# Altium schematic symbol library Tony_.SchLib: 178 symbols (part 4 of 6)
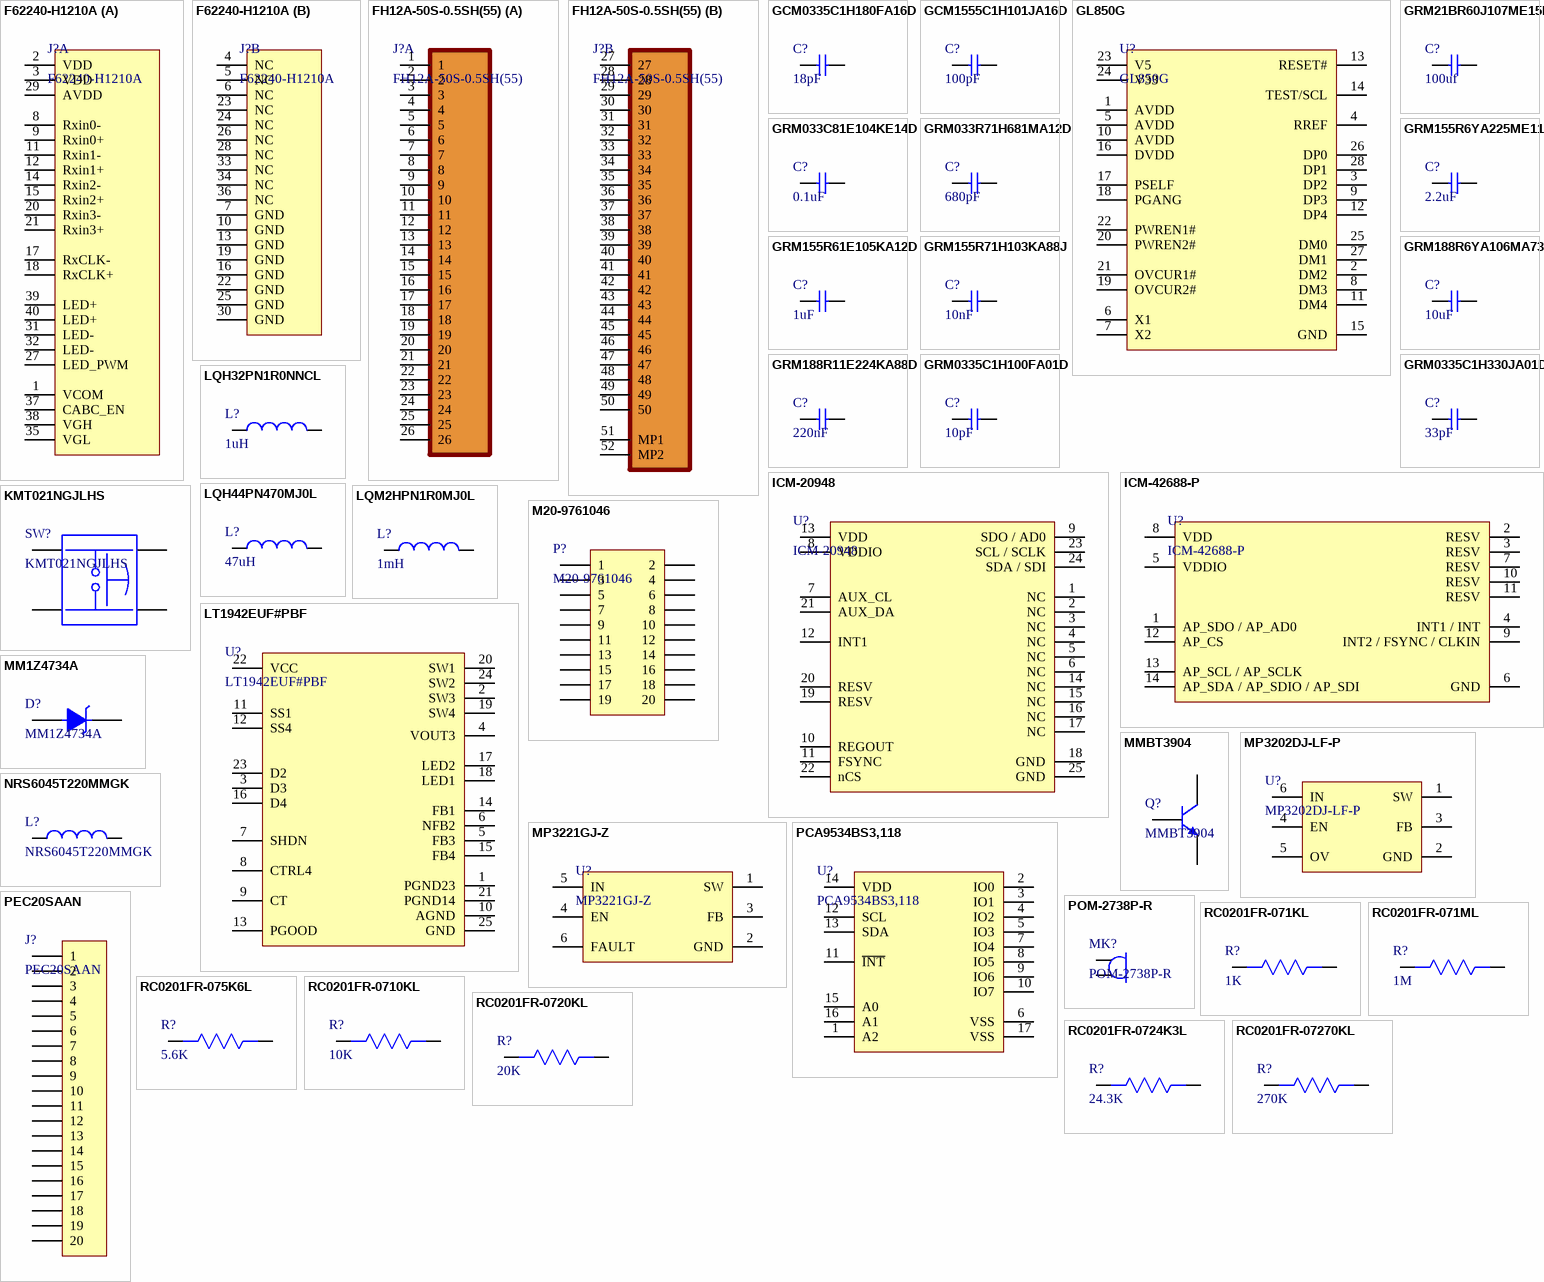
[diagram p7: symbols F62240-H1210A to RC0201FR-07270KL]

## GRM033C81E104KE14D
designator C?, comment 0.1uF
CAP CER 0.1UF 25V X6S 0201; Manufacturer: Murata; Manufacturer Part Number: GRM033C81E104KE14D; Capacitance: 100nF; Tolerance: 10%; Supplier 1: Digi-Key; RoHS: Yes; Category: Ceramic Capacitors; Stock 1: 91; Pricing 1: 1=0.10000, 10=0.05100, 50=0.02780, 100=0.02260, 500=0.01616, 1000=0.01270, 2500=0.01155, 5000=0.01063 (USD); Mount: Surface Mount; Case/Package: 0201; Case Code (Metric): 0603; Case Code (Imperial): 0201; Weight: 1.2E-05oz; Min Operating Temperature: -55°C; Max Operating Temperature: 105°C; Packaging: Tape and Reel; Voltage Rating: 25V; Dielectric: X6S; Termination: SMD/SMT; Voltage Rating (DC): 25V; Package Quantity: 15000; Length: 0.024inch; Width: 0.3mm; Height: 0.3mm; Thickness: 0.013inch; RoHS Compliant: Yes; ComponentLink1URL: http://www.mouser.com/ds/2/281/c02e-2905.pdf?src-supplier=Mouser; ComponentLink1Description: http://www.mouser.com/ds/2/281/c02e-2905.pdf?src-supplier=Mouser; ComponentLink2URL: http://www.farnell.com/datasheets/2722733.pdf?src-supplier=Farnell; ComponentLink2Description: http://www.farnell.com/datasheets/2722733.pdf?src-supplier=Farnell; ComponentLink3URL: http://search.murata.co.jp/Ceramy/image/img/A01X/G101/ENG/GRM033C81E104KE14-01.pdf?src-supplier=Digi-Key; ComponentLink3Description: http://search.murata.co.jp/Ceramy/image/img/A01X/G101/ENG/GRM033C81E104KE14-01.pdf?src-supplier=Digi-Key; Supplier Part Number 1: 490-10403-1-ND
footprint CAP 0201
pins: 1, 2

## GRM033R71H681MA12D
designator C?, comment 680pF
CAP CER 680PF 50V X7R 0201; Manufacturer: Murata; Manufacturer Part Number: GRM033R71H681MA12D; Tolerance: 20%; Supplier 1: Digi-Key; RoHS: Yes; Category: Ceramic Capacitors; Stock 1: 2794; Pricing 1: 1=0.10000, 10=0.02500, 50=0.01380, 100=0.01130, 500=0.00808, 1000=0.00635, 2500=0.00578, 5000=0.00531 (USD); Mount: Surface Mount; Case/Package: 0201; Case Code (Imperial): 0201; Case Code (Metric): 0603; Weight: 1.2E-05oz; Min Operating Temperature: -55°C; Max Operating Temperature: 125°C; Capacitance: 680pF; Packaging: Tape and Reel; Voltage Rating: 50V; Dielectric: X7R; Termination: SMD/SMT; Resistor Type: Ceramic; Voltage Rating (DC): 50V; Package Quantity: 15000; Length: 0.024inch; Width: 0.3mm; Height: 0.3mm; Thickness: 0.013inch; RoHS Compliant: Yes; ComponentLink1URL: http://www.mouser.com/ds/2/281/c02e-2905.pdf?src-supplier=Mouser; ComponentLink1Description: http://www.mouser.com/ds/2/281/c02e-2905.pdf?src-supplier=Mouser; ComponentLink2URL: http://search.murata.co.jp/Ceramy/image/img/A01X/G101/ENG/GRM033R71H681MA12-01.pdf?src-supplier=Digi-Key; ComponentLink2Description: http://search.murata.co.jp/Ceramy/image/img/A01X/G101/ENG/GRM033R71H681MA12-01.pdf?src-supplier=Digi-Key; ComponentLink3URL: https://search.murata.co.jp/Ceramy/image/img/A01X/G101/ENG/GRM033R71H681MA12-01.pdf?src-supplier=Digi-Key; ComponentLink3Description: https://search.murata.co.jp/Ceramy/image/img/A01X/G101/ENG/GRM033R71H681MA12-01.pdf?src-supplier=Digi-Key; Supplier Part Number 1: 490-16749-1-ND
footprint CAP 0201
pins: 1, 2

## GRM155R6YA225ME11D
designator C?, comment 2.2uF
CAP 2.2UF 35V X5R 20% 0402; Manufacturer: Murata; Manufacturer Part Number: GRM155R6YA225ME11D; Supplier 1: Digi-Key; Stock 1: 18773; Pricing 1: 1=0.26, 10=0.176, 100=0.0998, 500=0.07044, 1000=0.06163, 2500=0.0587, 5000=0.05429 (USD); Supplier Part Number 1: 490-18213-1-ND
footprint Cap0402
pins: 1, 2

## GRM155R61E105KA12D
designator C?, comment 1uF
CAP CER 1UF 25V X5R 0402; Manufacturer: Murata; Manufacturer Part Number: GRM155R61E105KA12D; Material: Ceramic; Tolerance: 10%; Supplier 1: Digi-Key; Stock 1: 1150750; Pricing 1: 1=0.11, 10=0.077, 100=0.0363, 500=0.02546, 1000=0.02108, 2500=0.01962, 5000=0.01795 (USD); Mount: Surface Mount; Case/Package: 0402; Weight: 0.000212oz; Case Code (Metric): 1005; Case Code (Imperial): 0402; Min Operating Temperature: -55°C; Max Operating Temperature: 85°C; Capacitance: 1uF; Voltage Rating: 25V; Packaging: Tape and Reel; Dielectric: X5R; Voltage: 25V; Termination: SMD/SMT; Voltage Rating (DC): 25V; Package Quantity: 10000; Length: 1mm; Height: 0.5mm; Width: 0.5mm; Thickness: 0.022inch; Depth: 0.5mm; REACH SVHC: No SVHC; Lead Free: Lead Free; ComponentLink1URL: http://www.farnell.com/datasheets/2048341.pdf?src-supplier=Element14; ComponentLink1Description: http://www.farnell.com/datasheets/2048341.pdf?src-supplier=Element14; Supplier Part Number 1: 490-10017-6-ND
footprint Cap0402
pins: 1, 2

## GRM155R71H103KA88J
designator C?, comment 10nF
CAP CER 10000PF 50V X7R 0402; Manufacturer: Murata; Manufacturer Part Number: GRM155R71H103KA88J; Tolerance: 10%; Supplier 1: Digi-Key; Stock 1: 2794495; Pricing 1: 1=0.1, 10=0.042, 100=0.0186, 500=0.01328, 1000=0.01044, 2500=0.00949, 5000=0.00873 (USD); Mount: Surface Mount; Case/Package: 0402; Case Code (Metric): 1005; Case Code (Imperial): 0402; Min Operating Temperature: -55°C; Max Operating Temperature: 125°C; Capacitance: 10nF; Voltage Rating: 50V; Packaging: Tape and Reel; Voltage Rating (DC): 50V; Package Quantity: 50000; Dielectric: X7R; Termination: SMD/SMT; Voltage: 50V; Length: 1mm; Height: 0.5mm; Width: 0.02inch; Thickness: 0.022inch; Depth: 0.5mm; Radiation Hardening: No; Lead Free: Lead Free; ComponentLink1URL: https://www.murata.com/~/media/webrenewal/support/library/catalog/products/capacitor/mlcc/c02e.ashx?la=en-us&src-supplier=Digi-Key; ComponentLink1Description: https://www.murata.com/~/media/webrenewal/support/library/catalog/products/capacitor/mlcc/c02e.ashx?la=en-us&src-supplier=Digi-Key; Supplier Part Number 1: 490-6351-1-ND
footprint Cap0402
pins: 1, 2

## GRM188R6YA106MA73D
designator C?, comment 10uF
CAP CER 10UF 35V X5R 0603; Manufacturer: Murata; Manufacturer Part Number: GRM188R6YA106MA73D; Tolerance: 20%; Supplier 1: Digi-Key; Stock 1: 11640; Pricing 1: 1=0.5, 10=0.346, 100=0.2076, 500=0.1557, 1000=0.13148 (USD); Mount: Surface Mount; Case/Package: 0603; Case Code (Metric): 1608; Case Code (Imperial): 0603; Min Operating Temperature: -55°C; Max Operating Temperature: 85°C; Packaging: Tape and Reel; Capacitance: 10uF; Voltage Rating: 35V; Voltage Rating (DC): 35V; Dielectric: X5R; Length: 0.063inch; Width: 0.031inch; Thickness: 0.039inch; ComponentLink1URL: http://search.murata.co.jp/Ceramy/image/img/A01X/G101/ENG/GRM188R6YA106MA73-01.pdf?src-supplier=Digi-Key; ComponentLink1Description: http://search.murata.co.jp/Ceramy/image/img/A01X/G101/ENG/GRM188R6YA106MA73-01.pdf?src-supplier=Digi-Key; ComponentLink2URL: http://search.murata.co.jp/Ceramy/image/img/A01X/G101/ENG/GRM188R6YA106MA73-01.pdf?src-supplier=Mouser; ComponentLink2Description: http://search.murata.co.jp/Ceramy/image/img/A01X/G101/ENG/GRM188R6YA106MA73-01.pdf?src-supplier=Mouser; ComponentLink3URL: https://www.murata.com/~/media/webrenewal/support/library/catalog/products/capacitor/mlcc/c02e.ashx?la=en-us&src-supplier=Digi-Key; ComponentLink3Description: https://www.murata.com/~/media/webrenewal/support/library/catalog/products/capacitor/mlcc/c02e.ashx?la=en-us&src-supplier=Digi-Key; ComponentLink4URL: http://search.murata.co.jp/Ceramy/image/img/A01X/G101/ENG/GRM188R6YA106MA73-01.pdf?src-supplier=Future+Electronics; ComponentLink4Description: http://search.murata.co.jp/Ceramy/image/img/A01X/G101/ENG/GRM188R6YA106MA73-01.pdf?src-supplier=Future+Electronics; ComponentLink5URL: http://search.murata.co.jp/Ceramy/image/img/A01X/G101/ENG/GRM188R6YA106MA73-01.pdf?src-supplier=TTI; ComponentLink5Description: http://search.murata.co.jp/Ceramy/image/img/A01X/G101/ENG/GRM188R6YA106MA73-01.pdf?src-supplier=TTI; Supplier Part Number 1: 490-13248-6-ND
footprint Cap0603
pins: 1, 2

## GRM188R11E224KA88D
designator C?, comment 220nF
CAP CER0.22uF 25V R 10%  0603; Manufacturer: Murata; Manufacturer Part Number: GRM188R11E224KA88D; Supplier 1: RSComponents; RoHS: Yes; Category: Ceramic Capacitors; Stock 1: 72; Pricing 1: 1000=0.02100, 2000=0.01900, 4000=0.01800, 8000=0.01800 (GBP); Case/Package: Ceramic; Min Operating Temperature: -55°C; Max Operating Temperature: 125°C; Capacitance: 220nF; Tolerance: 10%; Voltage Rating (DC): 25V; Length: 1.6mm; Width: 0.8mm; Height: 0.8mm; Thickness: 800um; Lead Free: Lead Free; RoHS Compliant: Yes; Supplier Part Number 1: 7980348P
footprint Cap0603
pins: 1, 2

## GRM0335C1H100FA01D
designator C?, comment 10pF
CAP CER 10PF 50V C0G/NP0 0201; Manufacturer: Murata; Manufacturer Part Number: GRM0335C1H100FA01D; Tolerance: 1%; Dielectric: C0G; Supplier 1: Digi-Key; RoHS: Yes; Category: Ceramic Capacitors; Stock 1: 317364; Pricing 1: 1=0.10000, 10=0.01900, 50=0.01060, 100=0.00860, 500=0.00616, 1000=0.00484, 2500=0.00440, 5000=0.00405 (USD); Mount: Surface Mount; Case/Package: 0201; Case Code (Metric): 0603; Case Code (Imperial): 0201; Min Operating Temperature: -55°C; Max Operating Temperature: 125°C; Termination: SMD/SMT; Package Quantity: 15000; Packaging: Tape and Reel; Capacitance: 10pF; Voltage Rating: 50V; Voltage Rating (DC): 50V; Length: 0.024inch; Width: 0.012inch; Height: 0.3mm; Thickness: 0.013inch; Lead Free: Lead Free; ComponentLink1URL: http://www.mouser.com/ds/2/281/c02e-2905.pdf?src-supplier=Mouser; ComponentLink1Description: http://www.mouser.com/ds/2/281/c02e-2905.pdf?src-supplier=Mouser; ComponentLink2URL: http://search.murata.co.jp/Ceramy/image/img/A01X/G101/ENG/GRM0335C1H100FA01-01.pdf?src-supplier=Digi-Key; ComponentLink2Description: http://search.murata.co.jp/Ceramy/image/img/A01X/G101/ENG/GRM0335C1H100FA01-01.pdf?src-supplier=Digi-Key; Supplier Part Number 1: 490-7750-1-ND
footprint CAP 0201
pins: 1, 2

## GRM0335C1H330JA01D
designator C?, comment 33pF
CAP CER 33PF 50V C0G/NP0 0201; Manufacturer: Murata; Manufacturer Part Number: GRM0335C1H330JA01D; Tolerance: 5%; Dielectric: C0G; Supplier 1: Digi-Key; RoHS: Yes; Category: Ceramic Capacitors; Stock 1: 972012; Pricing 1: 1=0.10000, 10=0.01100, 50=0.00600, 100=0.00490, 500=0.00346, 1000=0.00272, 2500=0.00248, 5000=0.00228 (USD); Mount: Surface Mount; Case/Package: 0201; Case Code (Metric): 0603; Case Code (Imperial): 0201; Min Operating Temperature: -55°C; Max Operating Temperature: 125°C; Voltage Rating: 50V; Capacitance: 33pF; Voltage Rating (DC): 50V; Packaging: Tape and Reel; Package Quantity: 15000; Termination: SMD/SMT; Voltage: 50V; Length: 0.6mm; Width: 0.3mm; Height: 0.3mm; Thickness: 0.013inch; Depth: 0.3mm; Radiation Hardening: No; Lead Free: Lead Free; ComponentLink1URL: https://datasheet.ciiva.com/11607/product-11607238.pdf?src-supplier=Avnet; ComponentLink1Description: https://datasheet.ciiva.com/11607/product-11607238.pdf?src-supplier=Avnet; ComponentLink2URL: https://datasheet.ciiva.com/6271/partnumbering-e-01-6271175.pdf?src-supplier=Digi-Key; ComponentLink2Description: https://datasheet.ciiva.com/6271/partnumbering-e-01-6271175.pdf?src-supplier=Digi-Key; ComponentLink3URL: https://datasheet.ciiva.com/6271/partnumbering-e-01-6271179.pdf?src-supplier=Digi-Key; ComponentLink3Description: https://datasheet.ciiva.com/6271/partnumbering-e-01-6271179.pdf?src-supplier=Digi-Key; Supplier Part Number 1: 490-6126-1-ND
footprint CAP 0201
pins: 1, 2

## ICM-20948
designator U?
IMU ACCEL/GYRO/COMPI2C/SPI 24QFN; Manufacturer: TDK InvenSense; Sensor Type: Accelerometer,Gyroscope,Magnetometer; Output Type: SPI,I2C; Supplier 1: Avnet; Manufacturer Part Number: ICM-20948; RoHS: Yes; Category: Inertial Measurement Units (IMUs); Pricing 1: 5000=3.86240, 10000=3.80800, 20000=3.69920, 30000=3.61760, 40000=3.48160, 50000=3.40000, 500000=3.31840 (USD); Mount: Surface Mount; Case/Package: QFN; Min Operating Temperature: -40°C; Max Operating Temperature: 85°C; Packaging: Tape and Reel; RoHS Compliant: Yes; ComponentLink1URL: http://www.farnell.com/datasheets/2632662.pdf?src-supplier=Farnell; ComponentLink1Description: http://www.farnell.com/datasheets/2632662.pdf?src-supplier=Farnell; ComponentLink2URL: https://www.invensense.com/wp-content/uploads/2016/06/App-Note-eMD-20x48-User-Guide.pdf?src-supplier=Avnet+Europe; ComponentLink2Description: https://www.invensense.com/wp-content/uploads/2016/06/App-Note-eMD-20x48-User-Guide.pdf?src-supplier=Avnet+Europe; ComponentLink3URL: https://www.invensense.com/wp-content/uploads/2016/06/App-Note-eMD-20x48-User-Guide.pdf?src-supplier=Digi-Key; ComponentLink3Description: https://www.invensense.com/wp-content/uploads/2016/06/App-Note-eMD-20x48-User-Guide.pdf?src-supplier=Digi-Key; ComponentLink4URL: http://www.farnell.com/datasheets/2632662.pdf?src-supplier=Element14; ComponentLink4Description: http://www.farnell.com/datasheets/2632662.pdf?src-supplier=Element14; ComponentLink5URL: https://www.invensense.com/wp-content/uploads/2016/06/App-Note-eMD-20x48-User-Guide.pdf?src-supplier=Avnet; ComponentLink5Description: https://www.invensense.com/wp-content/uploads/2016/06/App-Note-eMD-20x48-User-Guide.pdf?src-supplier=Avnet; ComponentLink6URL: https://www.invensense.com/wp-content/uploads/2016/06/App-Note-eMD-20x48-User-Guide.pdf?src-supplier=Component+Distributors+Inc.; ComponentLink6Description: https://www.invensense.com/wp-content/uploads/2016/06/App-Note-eMD-20x48-User-Guide.pdf?src-supplier=Component+Distributors+Inc.; Supplier Part Number 1: ICM-20948
footprint 24-QFN (3x3)
pins: 1 NC, 2 NC, 3 NC, 4 NC, 5 NC, 6 NC, 7 AUX_CL, 8 VDDIO, 9 SDO / AD0, 10 REGOUT, 11 FSYNC, 12 INT1, 13 VDD, 14 NC, 15 NC, 16 NC, 17 NC, 18 GND, 19 RESV, 20 RESV, 21 AUX_DA, 22 nCS, 23 SCL / SCLK, 24 SDA / SDI, 25 GND

## ICM-42688-P
designator U?
MOTION SENSOR; Manufacturer: TDK InvenSense; Supplier 1: Arrow Electronics; Manufacturer Part Number: ICM-42688-P; RoHS: No; Category: Inertial Measurement Units (IMUs); Stock 1: 5000; Pricing 1: 5000=3.04110 (USD); Supplier Part Number 1: ICM-42688-P
footprint ICM-42688-P
pins: 1 AP_SDO / AP_AD0, 2 RESV, 3 RESV, 4 INT1 / INT, 5 VDDIO, 6 GND, 7 RESV, 8 VDD, 9 INT2 / FSYNC / CLKIN, 10 RESV, 11 RESV, 12 AP_CS, 13 AP_SCL / AP_SCLK, 14 AP_SDA / AP_SDIO / AP_SDI

## KMT021NGJLHS
designator SW?
SWITCH TACTILE SPST-NO 0.05A 32V; Manufacturer: ITT C&K; Mechanical Life: 300000Cycles; Operating Force: 1.6N; Throw Configuration: SPST; Max Current Rating: 50mA; Power Rating: 500mW; Illumination Type: Non-Illuminated,Illuminated; Switch Travel: 0.15mm; Switch Function: Off-Mom; Actuator Type: Standard; Ratings: IP68,Waterproof,Dust Tight; Supplier 1: Digi-Key; Manufacturer Part Number: KMT021NGJLHS; RoHS: Yes; Category: Tactile Switches; Stock 1: 5223; Pricing 1: 1=0.30000, 10=0.29500, 25=0.27960, 100=0.25310, 250=0.23076, 500=0.21448, 1000=0.18297, 2500=0.17789 (USD); Mount: Surface Mount; Case/Package: SMD/SMT; Contact Material: Silver; Contact Plating: Silver; Min Operating Temperature: -40°C; Max Operating Temperature: 85°C; Max Voltage Rating (DC): 32V; Termination: J-Lead; Packaging: Tape and Reel; Package Quantity: 5000; Voltage Rating (DC): 32V; Current Rating: 50mA; Orientation: Straight; Series: KMT0; Length: 2.6mm; Depth: 3.4mm; Radiation Hardening: No; REACH SVHC: No SVHC; Lead Free: Lead Free; RoHS Compliant: Yes; ComponentLink1URL: https://datasheet.ciiva.com/5684/1443640-5684448.pdf?src-supplier=Farnell; ComponentLink1Description: https://datasheet.ciiva.com/5684/1443640-5684448.pdf?src-supplier=Farnell; ComponentLink2URL: https://datasheet.ciiva.com/2900/kmt-0xx-ngj-lhs-drawing-2900147.pdf?src-supplier=Digi-Key; ComponentLink2Description: https://datasheet.ciiva.com/2900/kmt-0xx-ngj-lhs-drawing-2900147.pdf?src-supplier=Digi-Key; ComponentLink3URL: https://datasheet.ciiva.com/2900/kmt-0xx-ngj-lhs-drawing-2900148.pdf?src-supplier=Digi-Key; ComponentLink3Description: https://datasheet.ciiva.com/2900/kmt-0xx-ngj-lhs-drawing-2900148.pdf?src-supplier=Digi-Key; ComponentLink4URL: https://datasheet.ciiva.com/2900/kmt-0xx-ngj-lhs-drawing-2900149.pdf?src-supplier=Digi-Key; ComponentLink4Description: https://datasheet.ciiva.com/2900/kmt-0xx-ngj-lhs-drawing-2900149.pdf?src-supplier=Digi-Key; ComponentLink5URL: https://datasheet.ciiva.com/22712/1443640-22712102.pdf?src-supplier=Element14; ComponentLink5Description: https://datasheet.ciiva.com/22712/1443640-22712102.pdf?src-supplier=Element14; ComponentLink6URL: https://datasheet.ciiva.com/7986/1443640-7986975.pdf?src-supplier=Element14; ComponentLink6Description: https://datasheet.ciiva.com/7986/1443640-7986975.pdf?src-supplier=Element14; Supplier Part Number 1: CKN10289CT-ND
footprint KMT021NGJLHS (Tactile Switches Ultra-LW Tact SW SMT SPNOFa 1.6N HF)
pins: 1, 2, 3, 4

## LQH32PN1R0NNCL
designator L?, comment 1uH
FIXED IND 1UH 2.5A 43.2 MOHM SMD; Manufacturer: Murata; Manufacturer Part Number: LQH32PN1R0NNCL; Core Material: Ferrite; Inductance Tolerance: 30%; Self Resonant Frequency: 100MHz; Shielding: Shielded; Saturation Current: 3A; DC Resistance (DCR): 43.2mR; Test Frequency: 1MHz; Max DC Current: 1.75A; Supplier 1: Mouser; RoHS: Yes; Category: Fixed Inductors; Stock 1: 228; Pricing 1: 1=0.48000, 10=0.33500, 50=0.33500, 100=0.28700, 1000=0.20100, 10000=0.19400 (USD); Mount: Surface Mount; Case/Package: 1210; Case Code (Metric): 3225; Case Code (Imperial): 1210; Weight: 0.000564oz; Min Operating Temperature: -40°C; Max Operating Temperature: 85°C; Package Quantity: 2000; Packaging: Tape and Reel; Tolerance: 30%; Current Rating: 2.5A; Resistor Type: Wirewound; Inductance: 1uH; Termination: SMD/SMT; Series: LQH32PN_NC; Length: 0.126inch; Width: 2.5mm; Height: 2mm; Height - Seated (Max): 0.086inch; REACH SVHC: No SVHC; Lead Free: Lead Free; RoHS Compliant: Yes; ComponentLink1URL: https://datasheet.ciiva.com/8002/1668059-8002720.pdf?src-supplier=Element14; ComponentLink1Description: https://datasheet.ciiva.com/8002/1668059-8002720.pdf?src-supplier=Element14; ComponentLink2URL: https://datasheet.ciiva.com/29691/o05e-29691893.pdf?src-supplier=Digi-Key; ComponentLink2Description: https://datasheet.ciiva.com/29691/o05e-29691893.pdf?src-supplier=Digi-Key; Supplier Part Number 1: 81-LQH32PN1R0NNCL
footprint LQH32PN1R0NNCL
footprint LQH32PN1R0NNCL.
pins: 1, 2

## LQH44PN470MJ0L
designator L?, comment 47uH
1515 Inductors (SMD) ROHS; Manufacturer: Murata Electronics; Tolerance: ±20%; Rated Current: 300mA; DC Resistance (DCR): 1.014Ω; Package: 1515; Inductance: 47uH
footprint LQH44PN470MJ0L (1515 Inductors (SMD) ROHS)
pins: 1, 2

## LQM2HPN1R0MJ0L
designator L?, comment 1mH
FIXED IND 1UH 1.5A 113 MOHM SMD; Manufacturer: Murata; Manufacturer Part Number: LQM2HPN1R0MJ0L; Core Material: Ferrite; Tolerance: 20%; Self Resonant Frequency: 70MHz; Shielding: Shielded; DC Resistance (DCR): 3.5R; Test Frequency: 1MHz; Current: 150mA; Supplier 1: Digi-Key; RoHS: Yes; Category: Fixed Inductors; Stock 1: 32294; Pricing 1: 1=0.28000, 10=0.24600, 25=0.21520, 50=0.18440, 100=0.16900, 250=0.15368, 500=0.14446, 1000=0.11065 (USD); Mount: Surface Mount; Case/Package: 1008; Case Code (Metric): 2520; Case Code (Imperial): 1008; Min Operating Temperature: -40°C; Max Operating Temperature: 125°C; Packaging: Tape and Reel; Package Quantity: 3000; Current Rating: 1.5A; Inductance: 1uH; Max DC Current: 1.5A; Termination: SMD/SMT; DC Current: 1.5A; Inductance Tolerance: 20%; Series: LQM2HP_J0; Length: 2.5mm; Width: 2mm; Height: 1.1mm; Depth: 2.2mm; Radiation Hardening: No; Military Standard: Not; REACH SVHC: No SVHC; Lead Free: Lead Free; RoHS Compliant: Yes; ComponentLink1URL: https://datasheet.ciiva.com/30489/0900766b812561f6-30489058.pdf?src-supplier=RSComponents; ComponentLink1Description: https://datasheet.ciiva.com/30489/0900766b812561f6-30489058.pdf?src-supplier=RSComponents; ComponentLink2URL: https://datasheet.ciiva.com/4960/product-4960053.pdf?src-supplier=Mouser; ComponentLink2Description: https://datasheet.ciiva.com/4960/product-4960053.pdf?src-supplier=Mouser; ComponentLink3URL: https://datasheet.ciiva.com/8510/l0075s0104lqm2hp-j0-8510485.pdf?src-supplier=Avnet; ComponentLink3Description: https://datasheet.ciiva.com/8510/l0075s0104lqm2hp-j0-8510485.pdf?src-supplier=Avnet; ComponentLink4URL: https://datasheet.ciiva.com/6709/l0075s0104lqm2hp-j0-6709723.pdf?src-supplier=Digi-Key; ComponentLink4Description: https://datasheet.ciiva.com/6709/l0075s0104lqm2hp-j0-6709723.pdf?src-supplier=Digi-Key; ComponentLink5URL: https://datasheet.ciiva.com/6709/l0075s0104lqm2hp-j0-6709724.pdf?src-supplier=Digi-Key; ComponentLink5Description: https://datasheet.ciiva.com/6709/l0075s0104lqm2hp-j0-6709724.pdf?src-supplier=Digi-Key; ComponentLink6URL: https://datasheet.ciiva.com/6709/l0075s0104lqm2hp-j0-6709725.pdf?src-supplier=Digi-Key; ComponentLink6Description: https://datasheet.ciiva.com/6709/l0075s0104lqm2hp-j0-6709725.pdf?src-supplier=Digi-Key; Supplier Part Number 1: 490-6699-1-ND
footprint IND-1008
pins: 1, 2

## LT1942EUF#PBF
designator U?
IC REG SW QUAD TFT LCD 24-QFN; Manufacturer: Analog Devices / Linear Technology; Min Input Voltage: 2.6V; Max Output Current: 4A; Max Input Voltage: 16V; Number of Outputs: 4; Output Voltage: 36V; Output Current: 750mA; Frequency: 1.2MHz; Min Output Voltage: 1.25V; Max Output Voltage: 1.2V; Output Type: Adjustable; Supplier 1: Digi-Key; Manufacturer Part Number: LT1942EUF#PBF; RoHS: Yes; Category: Voltage Regulators - Switching; Stock 1: 235; Pricing 1: 1=6.58000, 10=5.94800, 25=5.67160, 100=4.92450, 250=4.70320, 500=4.30650 (USD); Mount: Surface Mount; Case/Package: QFN; Number of Pins: 24; Min Operating Temperature: -40°C; Max Operating Temperature: 85°C; Max Supply Voltage: 16V; Min Supply Voltage: 2.6V; Package Quantity: 91; Packaging: Rail/Tube; Termination: SMD/SMT; Switching Frequency: 1.2MHz; Series: -; Length: 4mm; Width: 4mm; Height: 0.7mm; REACH SVHC: No SVHC; Lead Free: Lead Free; RoHS Compliant: Yes; ComponentLink1URL: https://datasheet.ciiva.com/4118/41364810s7494468n7433-4118973.pdf?src-supplier=Arrow+Electronics; ComponentLink1Description: https://datasheet.ciiva.com/4118/41364810s7494468n7433-4118973.pdf?src-supplier=Arrow+Electronics; ComponentLink2URL: https://datasheet.ciiva.com/25627/0900766b810ed99d-25627392.pdf?src-supplier=RSComponents; ComponentLink2Description: https://datasheet.ciiva.com/25627/0900766b810ed99d-25627392.pdf?src-supplier=RSComponents; ComponentLink3URL: https://datasheet.ciiva.com/6188/1717046-6188033.pdf?src-supplier=Farnell; ComponentLink3Description: https://datasheet.ciiva.com/6188/1717046-6188033.pdf?src-supplier=Farnell; ComponentLink4URL: https://datasheet.ciiva.com/26910/lt1942euf-pbf-26910561.pdf?src-supplier=IIIC; ComponentLink4Description: https://datasheet.ciiva.com/26910/lt1942euf-pbf-26910561.pdf?src-supplier=IIIC; ComponentLink5URL: https://datasheet.ciiva.com/22651/1717046-22651735.pdf?src-supplier=Element14; ComponentLink5Description: https://datasheet.ciiva.com/22651/1717046-22651735.pdf?src-supplier=Element14; ComponentLink6URL: https://datasheet.ciiva.com/7312/1717046-7312028.pdf?src-supplier=Newark; ComponentLink6Description: https://datasheet.ciiva.com/7312/1717046-7312028.pdf?src-supplier=Newark; Supplier Part Number 1: LT1942EUF#PBF-ND
footprint LT1942EUF#PBF (IC REG CONV TFT LCD 4OUT 24QFN)
pins: 1 PGND23, 2 SW3, 3 D3, 4 VOUT3, 5 FB3, 6 NFB2, 7 SHDN, 8 CTRL4, 9 CT, 10 AGND, 11 SS1, 12 SS4, 13 PGOOD, 14 FB1, 15 FB4, 16 D4, 17 LED2, 18 LED1, 19 SW4, 20 SW1, 21 PGND14, 22 VCC, 23 D2, 24 SW2, 25 GND

## M20-9761046
designator P?
CONN HEADER VERT 20POS 2.54MM; Manufacturer: Harwin; Max Current Rating: 3A; Contact Resistance: 30mR; Voltage Rating: 750V; Number of Positions: 20; Connector Type: Male Pin; Row Spacing: 0.1inch; Supplier 1: Digi-Key; Manufacturer Part Number: M20-9761046; Stock 1: 1185; Pricing 1: 1=0.62, 10=0.585, 100=0.4485, 500=0.39, 1000=0.32175, 5000=0.28275, 10000=0.26325 (USD); Mount: Through Hole; Contact Plating: Tin; Contact Material: Brass; Color: Black; Housing Color: Black; Housing Material: Nylon; Min Operating Temperature: -40°C; Max Operating Temperature: 105°C; Package Quantity: 300; Number of Rows: 2; Packaging: Bulk; Current Rating: 3A; Termination: Solder; Orientation: Straight; Length: 25.4mm; Pitch: 2.54mm; Contact Mating Length: 0.228inch; Depth: 5.08mm; ComponentLink1URL: http://www.mouser.com/ds/2/181/M20-976-350030.pdf?src-supplier=Mouser; ComponentLink1Description: http://www.mouser.com/ds/2/181/M20-976-350030.pdf?src-supplier=Mouser; Supplier Part Number 1: 952-1835-ND
footprint HDR2X10 (Connector; Header; 10x2 Position)
pins: 1, 2, 3, 4, 5, 6, 7, 8, 9, 10, 11, 12, 13, 14, 15, 16, 17, 18, 19, 20

## MM1Z4734A
designator D?
DIODE ZENER 5.6V 1W SOD123F; Manufacturer: ON Semiconductor / Fairchild; Manufacturer Part Number: MMSZ5V6CF; Tolerance: 5%; Impedance: 4R; Supplier 1: Arrow Electronics; RoHS: No; Category: Zener Diodes; Stock 1: 1; Pricing 1: 1=0.29450, 10=0.22220, 25=0.22020, 50=0.21840, 100=0.11270, 250=0.11160, 500=0.11050, 1000=0.08620, 3000=0.07380, 6000=0.07040, 15000=0.06690, 30000=0.06340, 75000=0.05990 (USD); Mount: Surface Mount; Case/Package: SOD; Number of Pins: 2; Weight: 0.0276g; Zener Voltage: 5.6V; Max Power Dissipation: 1W; Packaging: Tape and Reel; RoHS Compliant: No; ComponentLink1URL: http://www.farnell.com/datasheets/2572343.pdf?src-supplier=Farnell; ComponentLink1Description: http://www.farnell.com/datasheets/2572343.pdf?src-supplier=Farnell; ComponentLink2URL: http://www.onsemi.com/pub/Collateral/MMSZ36VCF-D.pdf?src-supplier=Digi-Key; ComponentLink2Description: http://www.onsemi.com/pub/Collateral/MMSZ36VCF-D.pdf?src-supplier=Digi-Key; Supplier Part Number 1: MMSZ5V6CF
footprint SOD-123F
pins: 1 CATHODE, 2 ANODE

## MMBT3904
designator Q?
TRANS NPN 40V 200MA SOT23-3; Manufacturer: ON Semiconductor / Fairchild; Max Power Dissipation: 350mW; Element Configuration: Single; Transition Frequency: 300MHz; Collector Base Voltage (VCBO): 60V; Emitter Base Voltage (VEBO): 6V; hFE Min: 100; Collector Emitter Saturation Voltage: 300mV; Number of Elements: 1; Supplier 1: Arrow Electronics; Manufacturer Part Number: MMBT3904; RoHS: Yes; Category: BJTs; Stock 1: 1; Pricing 1: 1=0.56240, 10=0.13670, 50=0.12330, 100=0.10020 (USD); Mount: Surface Mount; Case/Package: SOT-23; Number of Pins: 3; Contact Plating: Tin,Matte; Weight: 0.03g; Min Operating Temperature: -55°C; Max Operating Temperature: 150°C; Packaging: Tape and Reel; Polarity: NPN; Collector Emitter Breakdown Voltage: 40V; Package Quantity: 1; Collector Emitter Voltage (VCEO): 40V; Max Collector Current: 200mA; Gain Bandwidth Product: 300MHz; Power Dissipation: 350mW; Voltage Rating (DC): 40V; Max Breakdown Voltage: 40V; Current Rating: 200mA; Frequency: 300MHz; Max Frequency: 300MHz; Termination: SMD/SMT; Length: 0.25inch; Width: 0.25inch; Height: 0.25inch; Radiation Hardening: No; Lead Free: Lead Free; RoHS Compliant: Yes; REACH SVHC: No SVHC; ComponentLink1URL: https://datasheet.ciiva.com/971/mmbt3904-971892.pdf?src-supplier=Digi-Key; ComponentLink1Description: https://datasheet.ciiva.com/971/mmbt3904-971892.pdf?src-supplier=Digi-Key; ComponentLink2URL: https://datasheet.ciiva.com/971/mmbt3904-971893.pdf?src-supplier=Digi-Key; ComponentLink2Description: https://datasheet.ciiva.com/971/mmbt3904-971893.pdf?src-supplier=Digi-Key; ComponentLink3URL: https://datasheet.ciiva.com/22653/1922793-22653482.pdf?src-supplier=Element14; ComponentLink3Description: https://datasheet.ciiva.com/22653/1922793-22653482.pdf?src-supplier=Element14; ComponentLink4URL: https://datasheet.ciiva.com/971/mmbt3904-971891.pdf?src-supplier=Digi-Key; ComponentLink4Description: https://datasheet.ciiva.com/971/mmbt3904-971891.pdf?src-supplier=Digi-Key; ComponentLink5URL: https://datasheet.ciiva.com/26237/mmbt3904-26237242.pdf?src-supplier=Avnet+Europe; ComponentLink5Description: https://datasheet.ciiva.com/26237/mmbt3904-26237242.pdf?src-supplier=Avnet+Europe; ComponentLink6URL: https://datasheet.ciiva.com/7972/2n3904-7972669.pdf?src-supplier=Element14; ComponentLink6Description: https://datasheet.ciiva.com/7972/2n3904-7972669.pdf?src-supplier=Element14; ComponentLink7URL: https://datasheet.ciiva.com/16850/mmbt3904-16850397.pdf?src-supplier=Future+Electronics; ComponentLink7Description: https://datasheet.ciiva.com/16850/mmbt3904-16850397.pdf?src-supplier=Future+Electronics; ComponentLink8URL: https://datasheet.ciiva.com/11201/mmbt3904-11201775.pdf?src-supplier=Avnet; ComponentLink8Description: https://datasheet.ciiva.com/11201/mmbt3904-11201775.pdf?src-supplier=Avnet; Supplier Part Number 1: MMBT3904
footprint SOT-23 (TRANS NPN 40V 0.6A SOT23)
pins: 1 B, 2 E, 3 C

## MP3202DJ-LF-P
designator U?
IC LED DRIVER; Manufacturer: Monolithic Power Systems; Number of Outputs: 1; Max Supply Voltage: 6V; Output Voltage: 25V; Output Current per Channel: 1.33A; Frequency: 1.3MHz; Topology: Boost; Dimming: Analog,PWM; Supplier 1: Digi-Key; Manufacturer Part Number: MP3202DJ-LF-P; RoHS: Yes; Category: LED Drivers; Stock 1: 1282; Pricing 1: 1=2.88000, 10=2.58400, 25=2.43800, 100=1.95040, 250=1.70660 (USD); Mount: Surface Mount; Case/Package: SOT-23-6; Min Operating Temperature: -40°C; Max Operating Temperature: 85°C; Packaging: Tape and Reel; Package Quantity: 500; Series: -; RoHS Compliant: Yes; ComponentLink1URL: http://www.mouser.com/ds/2/277/MP3202_r0.91-371710.pdf?src-supplier=Mouser; ComponentLink1Description: http://www.mouser.com/ds/2/277/MP3202_r0.91-371710.pdf?src-supplier=Mouser; ComponentLink2URL: http://www.monolithicpower.com/DesktopModules/DocumentManage/API/Document/GetDocument?id=1215&src-supplier=Digi-Key; ComponentLink2Description: http://www.monolithicpower.com/DesktopModules/DocumentManage/API/Document/GetDocument?id=1215&src-supplier=Digi-Key; ComponentLink3URL: https://www.monolithicpower.com/pub/media/document/MP3202_r0.91.pdf?src-supplier=Digi-Key; ComponentLink3Description: https://www.monolithicpower.com/pub/media/document/MP3202_r0.91.pdf?src-supplier=Digi-Key; ComponentLink4URL: http://www.monolithicpower.com/pub/media/document/MP3202_r0.91.pdf?src-supplier=Digi-Key; ComponentLink4Description: http://www.monolithicpower.com/pub/media/document/MP3202_r0.91.pdf?src-supplier=Digi-Key; Supplier Part Number 1: 1589-1151-1-ND
footprint SOT-23-6 (IC BAT CHG LI-ION 1 CELL SOT23-6)
pins: 1 SW, 2 GND, 3 FB, 4 EN, 5 OV, 6 IN

## MP3221GJ-Z
designator U?
IC REG BOOST ADJ 2.7A TSOT23-6; Manufacturer: Monolithic Power Systems; Max Input Voltage: 6V; Min Input Voltage: 2.5V; Number of Outputs: 1; Switching Frequency: 1.2MHz; Operating Supply Current: 270uA; Min Output Voltage: 3V; Synchronous Rectifier: No; Output Type: Adjustable; Output Configuration: Positive; Supplier 1: Digi-Key; Manufacturer Part Number: MP3221GJ-Z; RoHS: Yes; Category: Voltage Regulators - Switching; Stock 1: 2434; Pricing 1: 1=1.97000, 10=1.77000, 25=1.66960, 100=1.33560, 250=1.16864, 500=1.13526, 1000=0.90153 (USD); Mount: Surface Mount; Case/Package: SOT-23-6; Number of Pins: 6; Min Operating Temperature: -40°C; Max Operating Temperature: 125°C; Output Voltage: 6V; Output Current: 2.7A; Packaging: Tape and Reel; Package Quantity: 3000; Min Supply Voltage: 2.5V; Max Output Current: 2.7A; Max Output Voltage: 6V; Topology: Boost; Operating Supply Voltage: 6V; Radiation Hardening: No; Lead Free: Lead Free; RoHS Compliant: Yes; ComponentLink1URL: http://www.mouser.com/ds/2/277/MP3221_r1.0-371792.pdf?src-supplier=Mouser; ComponentLink1Description: http://www.mouser.com/ds/2/277/MP3221_r1.0-371792.pdf?src-supplier=Mouser; ComponentLink2URL: https://www.monolithicpower.com/Lists/Product_NonSynchronous%20Switcher_5745/DispForm.aspx?ID=24&src-supplier=Avnet; ComponentLink2Description: https://www.monolithicpower.com/Lists/Product_NonSynchronous%20Switcher_5745/DispForm.aspx?ID=24&src-supplier=Avnet; ComponentLink3URL: https://www.monolithicpower.com/Lists/Product_NonSynchronous%20Switcher_5745/DispForm.aspx?ID=24&src-supplier=Avnet+Asia; ComponentLink3Description: https://www.monolithicpower.com/Lists/Product_NonSynchronous%20Switcher_5745/DispForm.aspx?ID=24&src-supplier=Avnet+Asia; ComponentLink4URL: http://www.monolithicpower.com/DesktopModules/DocumentManage/API/Document/getDocument?id=891&src-supplier=Digi-Key; ComponentLink4Description: http://www.monolithicpower.com/DesktopModules/DocumentManage/API/Document/getDocument?id=891&src-supplier=Digi-Key; Supplier Part Number 1: 1589-1909-1-ND
footprint TSOT-23-6
pins: 1 SW, 2 GND, 3 FB, 4 EN, 5 IN, 6 FAULT

## NRS6045T220MMGK
designator L?
IND SMD 22uH 1.6A 20%, T&R; Manufacturer: Taiyo Yuden; Core Material: Ferrite; Self Resonant Frequency: 7MHz; DC Resistance (DCR): 139.1mR; Max DC Current: 2A; Shielding: Shielded; Test Frequency: 100kHz; Supplier 1: Digi-Key; Manufacturer Part Number: NRS6045T220MMGK; RoHS: Yes; Category: Fixed Inductors; Stock 1: 13300; Pricing 1: 1=0.41000, 10=0.36500, 25=0.31920, 50=0.27360, 100=0.25080, 250=0.22796, 500=0.21430 (USD); Mount: Surface Mount; Case/Package: Nonstandard; Number of Pins: 2; Min Operating Temperature: -25°C; Max Operating Temperature: 125°C; Inductance: 22uH; Tolerance: 20%; Package Quantity: 1500; Current Rating: 1.6A; Saturation Current: 2A; Packaging: Tape and Reel; Resistor Type: Wirewound; Termination: SMD/SMT; Inductance Tolerance: 20%; RMS Current (Irms): 1.6A; Series: NRS; Length: 6mm; Width: 0.236inch; Height: 4.5mm; Height - Seated (Max): 0.177inch; Depth: 6.2mm; Lead Pitch: 4.7mm; Radiation Hardening: No; Halogen Free: Halogen Free; REACH SVHC: Unknown; Lead Free: Lead Free; RoHS Compliant: Yes; ComponentLink1URL: https://datasheet.ciiva.com/25607/0900766b810b3cd2-25607073.pdf?src-supplier=RSComponents; ComponentLink1Description: https://datasheet.ciiva.com/25607/0900766b810b3cd2-25607073.pdf?src-supplier=RSComponents; ComponentLink2URL: https://datasheet.ciiva.com/1044/nrs6045t220mmgk-ss-1044019.pdf?src-supplier=Digi-Key; ComponentLink2Description: https://datasheet.ciiva.com/1044/nrs6045t220mmgk-ss-1044019.pdf?src-supplier=Digi-Key; ComponentLink3URL: https://datasheet.ciiva.com/8500/nrs6045t220mmgk-ss-8500556.pdf?src-supplier=Avnet; ComponentLink3Description: https://datasheet.ciiva.com/8500/nrs6045t220mmgk-ss-8500556.pdf?src-supplier=Avnet; ComponentLink4URL: https://datasheet.ciiva.com/4958/wound04-e-4958152.pdf?src-supplier=Mouser; ComponentLink4Description: https://datasheet.ciiva.com/4958/wound04-e-4958152.pdf?src-supplier=Mouser; ComponentLink5URL: https://datasheet.ciiva.com/22710/1909430-22710364.pdf?src-supplier=Element14; ComponentLink5Description: https://datasheet.ciiva.com/22710/1909430-22710364.pdf?src-supplier=Element14; Supplier Part Number 1: 587-2952-1-ND
footprint NRS6045T220MMGK (FIXED IND 22UH 1.6A 139.1MOHM SM)
pins: 1, 2

## PCA9534BS3,118
designator U?
NXP - PCA9534BS3,118 - I/O EXPANDER, 8BIT, 400KHZ, HVQFN-16; Manufacturer: NXP Semiconductors; Interface: I2C,SMBus,Serial; Output Current: 50mA; Number of I/Os: 8; Max Power Dissipation: 200mW; Operating Supply Voltage: 5.5V; Supplier 1: Digi-Key; Manufacturer Part Number: PCA9534BS3,118; RoHS: Yes; Category: Interface ICs; Stock 1: 1204; Pricing 1: 1=1.61000, 10=1.48200 (USD); Mount: Surface Mount; Number of Pins: 16; Min Operating Temperature: -40°C; Max Operating Temperature: 85°C; Package Quantity: 1; Packaging: Tape and Reel; Frequency: 400kHz; Max Frequency: 400kHz; Series: -; Lead Free: Lead Free; RoHS Compliant: Yes; ComponentLink1URL: https://datasheet.ciiva.com/1780/pca9534-1780006.pdf?src-supplier=Digi-Key; ComponentLink1Description: https://datasheet.ciiva.com/1780/pca9534-1780006.pdf?src-supplier=Digi-Key; ComponentLink2URL: https://datasheet.ciiva.com/1780/pca9534-1780007.pdf?src-supplier=Digi-Key; ComponentLink2Description: https://datasheet.ciiva.com/1780/pca9534-1780007.pdf?src-supplier=Digi-Key; ComponentLink3URL: https://datasheet.ciiva.com/1780/pca9534-1780008.pdf?src-supplier=Digi-Key; ComponentLink3Description: https://datasheet.ciiva.com/1780/pca9534-1780008.pdf?src-supplier=Digi-Key; Supplier Part Number 1: 568-8706-1-ND
footprint 16HVQFN (IC I/O EXPANDER I2C 8B 16HVQFN)
pins: 1 A2, 2 IO0, 3 IO1, 4 IO2, 5 IO3, 6 VSS, 7 IO4, 8 IO5, 9 IO6, 10 IO7, 11 ~{INT}, 12 SCL, 13 SDA, 14 VDD, 15 A0, 16 A1, 17 VSS

## PEC20SAAN
designator J?
CONN HEADER .100 SINGL STR 20POS; Manufacturer: Sullins; Number of Positions: 20; Gender: Male; Connector Type: Male Pin; Pitch: 0.1inch; Supplier 1: Digi-Key; Manufacturer Part Number: PEC20SAAN; RoHS: Yes; Category: Connectors; Stock 1: 1379; Pricing 1: 1=1.06000, 10=0.93500, 25=0.88000, 50=0.84340, 100=0.80670, 250=0.73336, 500=0.66000 (USD); Mount: Through Hole; Color: Black; Contact Plating: Tin; Housing Color: Black; Contact Material: Bronze; Housing Material: Plastic; Package Quantity: 1; Number of Rows: 1; Packaging: Bulk; Termination: Solder; Number of Contacts: 20; Series: -; Contact Type: Male Pin; Length: 50.8mm; Width: 2.54mm; Height: 2.54mm; Contact Mating Length: 0.23inch; Lead Free: Lead Free; RoHS Compliant: Yes; ComponentLink1URL: https://s3.amazonaws.com/catalogspreads-pdf/PAGE108-109%20.100%20MALE%20HDR.pdf?src-supplier=Digi-Key; ComponentLink1Description: https://s3.amazonaws.com/catalogspreads-pdf/PAGE108-109%20.100%20MALE%20HDR.pdf?src-supplier=Digi-Key; Supplier Part Number 1: S1012E-20-ND
footprint 20 Pin Header
pins: 1, 2, 3, 4, 5, 6, 7, 8, 9, 10, 11, 12, 13, 14, 15, 16, 17, 18, 19, 20

## POM-2738P-R
designator MK?
MIC COND ANALOG OMNI -38DB 6MM D; Manufacturer: Projects Unlimited; Shape: Circular,Round; Impedance: 2.2kR; Voltage Rating: 10V; Nominal Supply Voltage (DC): 2V; Direction: Omnidirectional; Operating Supply Current: 500uA; Supplier 1: Digi-Key; Manufacturer Part Number: POM-2738P-R; RoHS: Yes; Category: Microphones; Stock 1: 1715; Pricing 1: 1=2.06000, 10=1.71100, 25=1.58120, 50=1.48720, 100=1.39620, 500=1.19848, 1000=1.17040 (USD); Mount: PCB; Packaging: Bulk; Package Quantity: 100; Max Supply Voltage (DC): 10V; Termination: PC Pins; Output Type: Analog; Max Supply Voltage: 2V; Diameter: 6mm; Length: 6mm; Width: 6mm; Height: 2.9mm; Depth: 2.7mm; Lead Free: Lead Free; REACH SVHC: No SVHC; ComponentLink1URL: https://datasheet.ciiva.com/2/pom-2738p-r-2038.pdf?src-supplier=Digi-Key; ComponentLink1Description: https://datasheet.ciiva.com/2/pom-2738p-r-2038.pdf?src-supplier=Digi-Key; ComponentLink2URL: https://datasheet.ciiva.com/4624/pom-2738p-r-42784-4624424.pdf?src-supplier=Mouser; ComponentLink2Description: https://datasheet.ciiva.com/4624/pom-2738p-r-42784-4624424.pdf?src-supplier=Mouser; ComponentLink3URL: https://datasheet.ciiva.com/6765/40103-6765772.pdf?src-supplier=Newark; ComponentLink3Description: https://datasheet.ciiva.com/6765/40103-6765772.pdf?src-supplier=Newark; ComponentLink4URL: https://datasheet.ciiva.com/1324/40103-1324045.pdf?src-supplier=Element14; ComponentLink4Description: https://datasheet.ciiva.com/1324/40103-1324045.pdf?src-supplier=Element14; Supplier Part Number 1: 668-1158-ND
footprint POM-2738P-R
pins: 1 TERM -, 2 TERM +

## RC0201FR-071KL
designator R?, comment 1K
RES SMD 1K OHM 1% 1/20W 0201; Manufacturer: Yageo; Manufacturer Part Number: RC0201FR-071KL; Resistance: 1kR; Temperature Coefficient: 200ppm/°C; Power Rating: 50mW; Voltage Rating: 25V; Supplier 1: Digi-Key; Stock 1: 3437969; Pricing 1: 1=0.1, 10=0.04, 100=0.0165, 1000=0.00739, 2500=0.00642, 5000=0.0053 (USD); Case/Package: 0201; Contact Plating: Tin,Matte; Case Code (Metric): 0603; Case Code (Imperial): 0201; Min Operating Temperature: -55°C; Max Operating Temperature: 125°C; Tolerance: 1%; Composition: Thick Film; Package Quantity: 10000; Packaging: Tape and Reel; Number of Terminations: 2; Termination: SMD/SMT; Military Standard: Not; Max Power Dissipation: 50mW; Working Voltage: 25V; Features: Moisture Resistant; Length: 0.024inch; Height: 0.01inch; Width: 0.012inch; Depth: 0.3mm; Radiation Hardening: No; REACH SVHC: Unknown; Lead Free: Lead Free; ComponentLink1URL: http://www.yageo.com/documents/recent/PYu-RC0201_51_RoHS_L_8.pdf?src-supplier=Avnet+Europe; ComponentLink1Description: http://www.yageo.com/documents/recent/PYu-RC0201_51_RoHS_L_8.pdf?src-supplier=Avnet+Europe; ComponentLink2URL: http://www.farnell.com/datasheets/2167052.pdf?src-supplier=Element14; ComponentLink2Description: http://www.farnell.com/datasheets/2167052.pdf?src-supplier=Element14; ComponentLink3URL: http://www.yageo.com/documents/recent/PYu-RC_Group_51_RoHS_L_10.pdf?src-supplier=Digi-Key; ComponentLink3Description: http://www.yageo.com/documents/recent/PYu-RC_Group_51_RoHS_L_10.pdf?src-supplier=Digi-Key; ComponentLink4URL: http://www.yageo.com/documents/recent/PYu-RC0201_51_RoHS_L_8.pdf?src-supplier=Avnet; ComponentLink4Description: http://www.yageo.com/documents/recent/PYu-RC0201_51_RoHS_L_8.pdf?src-supplier=Avnet; Supplier Part Number 1: 311-1KMCT-ND
footprint Res-0201
pins: 1, 2

## RC0201FR-071ML
designator R?, comment 1M
RES SMD 1M OHM 1% 1/20W 0201; Manufacturer: Yageo; Manufacturer Part Number: RC0201FR-071ML; Resistance: 1MR; Temperature Coefficient: 200ppm/°C; Power Rating: 50mW; Voltage Rating: 25V; Supplier 1: Digi-Key; Stock 1: 3125521; Pricing 1: 1=0.1, 10=0.04, 100=0.0165, 1000=0.00739, 2500=0.00642, 5000=0.0053 (USD); Case/Package: 0201; Contact Plating: Tin,Matte; Case Code (Imperial): 0201; Case Code (Metric): 0603; Min Operating Temperature: -55°C; Max Operating Temperature: 125°C; Tolerance: 1%; Composition: Thick Film; Packaging: Tape and Reel; Package Quantity: 10000; Termination: SMD/SMT; Number of Terminations: 2; Military Standard: Not; Max Power Dissipation: 50mW; Features: Moisture Resistant; Length: 0.6mm; Height: 0.01inch; Width: 0.3mm; Depth: 0.3mm; Radiation Hardening: No; REACH SVHC: Unknown; Lead Free: Lead Free; ComponentLink1URL: http://www.farnell.com/datasheets/2167052.pdf?src-supplier=Element14; ComponentLink1Description: http://www.farnell.com/datasheets/2167052.pdf?src-supplier=Element14; ComponentLink2URL: http://www.yageo.com/documents/recent/PYu-RC_Group_51_RoHS_L_10.pdf?src-supplier=Digi-Key; ComponentLink2Description: http://www.yageo.com/documents/recent/PYu-RC_Group_51_RoHS_L_10.pdf?src-supplier=Digi-Key; ComponentLink3URL: http://www.yageo.com/documents/recent/PYu-RC_Group_51_RoHS_L_9.pdf?src-supplier=Digi-Key; ComponentLink3Description: http://www.yageo.com/documents/recent/PYu-RC_Group_51_RoHS_L_9.pdf?src-supplier=Digi-Key; Supplier Part Number 1: 311-1MMCT-ND
footprint Res-0201
pins: 1, 2

## RC0201FR-075K6L
designator R?, comment 5.6K
RES SMD 5.6K OHM 1% 1/20W 0201; Manufacturer: Yageo; Manufacturer Part Number: RC0201FR-075K6L; Resistance: 5.6kR; Power Rating: 50mW; Voltage Rating: 25V; Temperature Coefficient: 200ppm/°C; Supplier 1: Digi-Key; RoHS: Yes; Category: Chip SMD Resistors; Stock 1: 2; Pricing 1: 1=0.10000, 10=0.04000, 100=0.01630, 1000=0.00732, 2500=0.00635, 5000=0.00525 (USD); Case/Package: 0201; Case Code (Metric): 0603; Case Code (Imperial): 0201; Min Operating Temperature: -55°C; Max Operating Temperature: 125°C; Package Quantity: 10000; Packaging: Tape and Reel; Tolerance: 1%; Resistor Type: Thick Film; Number of Terminations: 2; Termination: SMD/SMT; Max Power Dissipation: 50mW; Features: Moisture Resistant; Series: RC; Resistance Tolerance: 1%; Length: 0.024inch; Width: 0.012inch; Height: 0.01inch; REACH SVHC: No SVHC; RoHS Compliant: Yes; ComponentLink1URL: https://datasheet.ciiva.com/22661/1563626-22661325.pdf?src-supplier=Element14; ComponentLink1Description: https://datasheet.ciiva.com/22661/1563626-22661325.pdf?src-supplier=Element14; Supplier Part Number 1: YAG2346CT-ND
footprint Res-0201
pins: 1, 2

## RC0201FR-0710KL
designator R?, comment 10K
RES SMD 10K OHM 1% 1/20W 0201; Manufacturer: Yageo; Manufacturer Part Number: RC0201FR-0710KL; Resistance: 10kR; Temperature Coefficient: 200ppm/°C; Power Rating: 50mW; Voltage Rating: 25V; Supplier 1: Digi-Key; Stock 1: 12729696; Pricing 1: 1=0.1, 10=0.042, 100=0.0171, 1000=0.00768, 2500=0.00666, 5000=0.00551 (USD); Case/Package: 0201; Number of Pins: 2; Weight: 6E-06oz; Contact Plating: Tin,Matte; Case Code (Imperial): 0201; Case Code (Metric): 0603; Min Operating Temperature: -55°C; Max Operating Temperature: 125°C; Tolerance: 1%; Composition: Thick Film; Packaging: Tape and Reel; Package Quantity: 1; Termination: SMD/SMT; Number of Terminations: 2; Military Standard: Not; Max Power Dissipation: 50mW; Voltage Rating (DC): 25V; Working Voltage: 25V; Features: Moisture Resistant; Length: 0.6mm; Height: 0.01inch; Width: 0.3mm; Depth: 0.3mm; Radiation Hardening: No; REACH SVHC: No SVHC; Lead Free: Lead Free; ComponentLink1URL: http://www.yageo.com/documents/recent/PYu-RC_Group_51_RoHS_L_10.pdf?src-supplier=Digi-Key; ComponentLink1Description: http://www.yageo.com/documents/recent/PYu-RC_Group_51_RoHS_L_10.pdf?src-supplier=Digi-Key; ComponentLink2URL: http://www.farnell.com/datasheets/2167052.pdf?src-supplier=Element14; ComponentLink2Description: http://www.farnell.com/datasheets/2167052.pdf?src-supplier=Element14; ComponentLink3URL: http://www.yageo.com/documents/recent/PYu-RC0201_51_RoHS_L_8.pdf?src-supplier=Avnet; ComponentLink3Description: http://www.yageo.com/documents/recent/PYu-RC0201_51_RoHS_L_8.pdf?src-supplier=Avnet; ComponentLink4URL: http://www.yageo.com/documents/recent/PYu-RC0201_51_RoHS_L_8.pdf?src-supplier=Avnet+Europe; ComponentLink4Description: http://www.yageo.com/documents/recent/PYu-RC0201_51_RoHS_L_8.pdf?src-supplier=Avnet+Europe; ComponentLink5URL: https://www.verical.com/server-webapp/html/getDatasheet?partID=421074&src-supplier=Verical; ComponentLink5Description: https://www.verical.com/server-webapp/html/getDatasheet?partID=421074&src-supplier=Verical; ComponentLink6URL: http://www.farnell.com/datasheets/1421516.pdf?src-supplier=Element14; ComponentLink6Description: http://www.farnell.com/datasheets/1421516.pdf?src-supplier=Element14; Supplier Part Number 1: 311-10.0KMCT-ND
footprint Res-0201
pins: 1, 2

## RC0201FR-0720KL
designator R?, comment 20K
RES SMD 20K OHM 1% 1/20W 0201; Manufacturer: Yageo; Manufacturer Part Number: RC0201FR-0720KL; Voltage Rating: 25V; Resistance: 20kR; Power Rating: 50mW; Temperature Coefficient: 200ppm/°C; Supplier 1: Digi-Key; Stock 1: 1339619; Pricing 1: 1=0.1, 10=0.042, 100=0.0171, 1000=0.00768, 2500=0.00666, 5000=0.00551 (USD); Case/Package: 0201; Case Code (Imperial): 0201; Case Code (Metric): 0603; Min Operating Temperature: -55°C; Max Operating Temperature: 125°C; Tolerance: 1%; Packaging: Tape and Reel; Package Quantity: 10000; Composition: Thick Film; Termination: SMD/SMT; Number of Terminations: 2; Military Standard: Not; Max Power Dissipation: 50mW; Features: Moisture Resistant; Length: 0.024inch; Height: 0.01inch; Width: 0.012inch; Depth: 0.3mm; Lead Free: Lead Free; ComponentLink1URL: http://www.yageo.com.tw/exep/pages/download/literatures/PYu-R_INT-thick_7.pdf?src-supplier=Digi-Key; ComponentLink1Description: http://www.yageo.com.tw/exep/pages/download/literatures/PYu-R_INT-thick_7.pdf?src-supplier=Digi-Key; Supplier Part Number 1: YAG2276CT-ND
footprint Res-0201
pins: 1, 2

## RC0201FR-0724K3L
designator R?, comment 24.3K
RES SMD 24.3K OHM 1% 1/20W 0201; Manufacturer: Yageo; Manufacturer Part Number: RC0201FR-0724K3L; Resistance: 24.3kR; Max Power Dissipation: 50mW; Temperature Coefficient: 200ppm/°C; Supplier 1: Digi-Key; RoHS: Yes; Category: Chip SMD Resistors; Stock 1: 97; Pricing 1: 1=0.10000, 10=0.04200, 100=0.01700, 1000=0.00765, 2500=0.00664, 5000=0.00548 (USD); Case/Package: 0201; Case Code (Metric): 0603; Case Code (Imperial): 0201; Min Operating Temperature: -55°C; Max Operating Temperature: 125°C; Tolerance: 1%; Packaging: Tape and Reel; Resistor Type: Thick Film; Number of Terminations: 2; Features: Moisture Resistant; Length: 0.024inch; Width: 0.012inch; Height: 0.01inch; RoHS Compliant: Yes; ComponentLink1URL: http://www.yageo.com/documents/recent/PYu-RC_Group_51_RoHS_L_9.pdf?src-supplier=Digi-Key; ComponentLink1Description: http://www.yageo.com/documents/recent/PYu-RC_Group_51_RoHS_L_9.pdf?src-supplier=Digi-Key; ComponentLink2URL: http://www.yageo.com.tw/exep/pages/download/literatures/PYu-R_INT-thick_7.pdf?src-supplier=Digi-Key; ComponentLink2Description: http://www.yageo.com.tw/exep/pages/download/literatures/PYu-R_INT-thick_7.pdf?src-supplier=Digi-Key; Supplier Part Number 1: YAG2532CT-ND
footprint Res-0201
pins: 1, 2

## RC0201FR-07270KL
designator R?, comment 270K
RES SMD 270K OHM 1% 1/20W 0201; Manufacturer: Yageo; Manufacturer Part Number: RC0201FR-07270KL; Resistance: 270kR; Power Rating: 50mW; Voltage Rating: 25V; Temperature Coefficient: 200ppm/°C; Supplier 1: Digi-Key; RoHS: Yes; Category: Chip SMD Resistors; Stock 1: 96171; Pricing 1: 1=0.10000, 10=0.04200, 100=0.01700, 1000=0.00765, 2500=0.00664, 5000=0.00548 (USD); Case/Package: 0201; Case Code (Imperial): 0201; Case Code (Metric): 0603; Min Operating Temperature: -55°C; Max Operating Temperature: 125°C; Tolerance: 1%; Packaging: Tape and Reel; Resistor Type: Thick Film; Number of Terminations: 2; Termination: SMD/SMT; Max Power Dissipation: 50mW; Features: Moisture Resistant; Series: RC; Resistance Tolerance: 1%; Length: 0.024inch; Width: 0.012inch; Height: 0.01inch; REACH SVHC: Unknown; RoHS Compliant: Yes; ComponentLink1URL: https://datasheet.ciiva.com/7672/1563626-7672216.pdf?src-supplier=Element14; ComponentLink1Description: https://datasheet.ciiva.com/7672/1563626-7672216.pdf?src-supplier=Element14; Supplier Part Number 1: YAG2548CT-ND
footprint Res-0201
pins: 1, 2

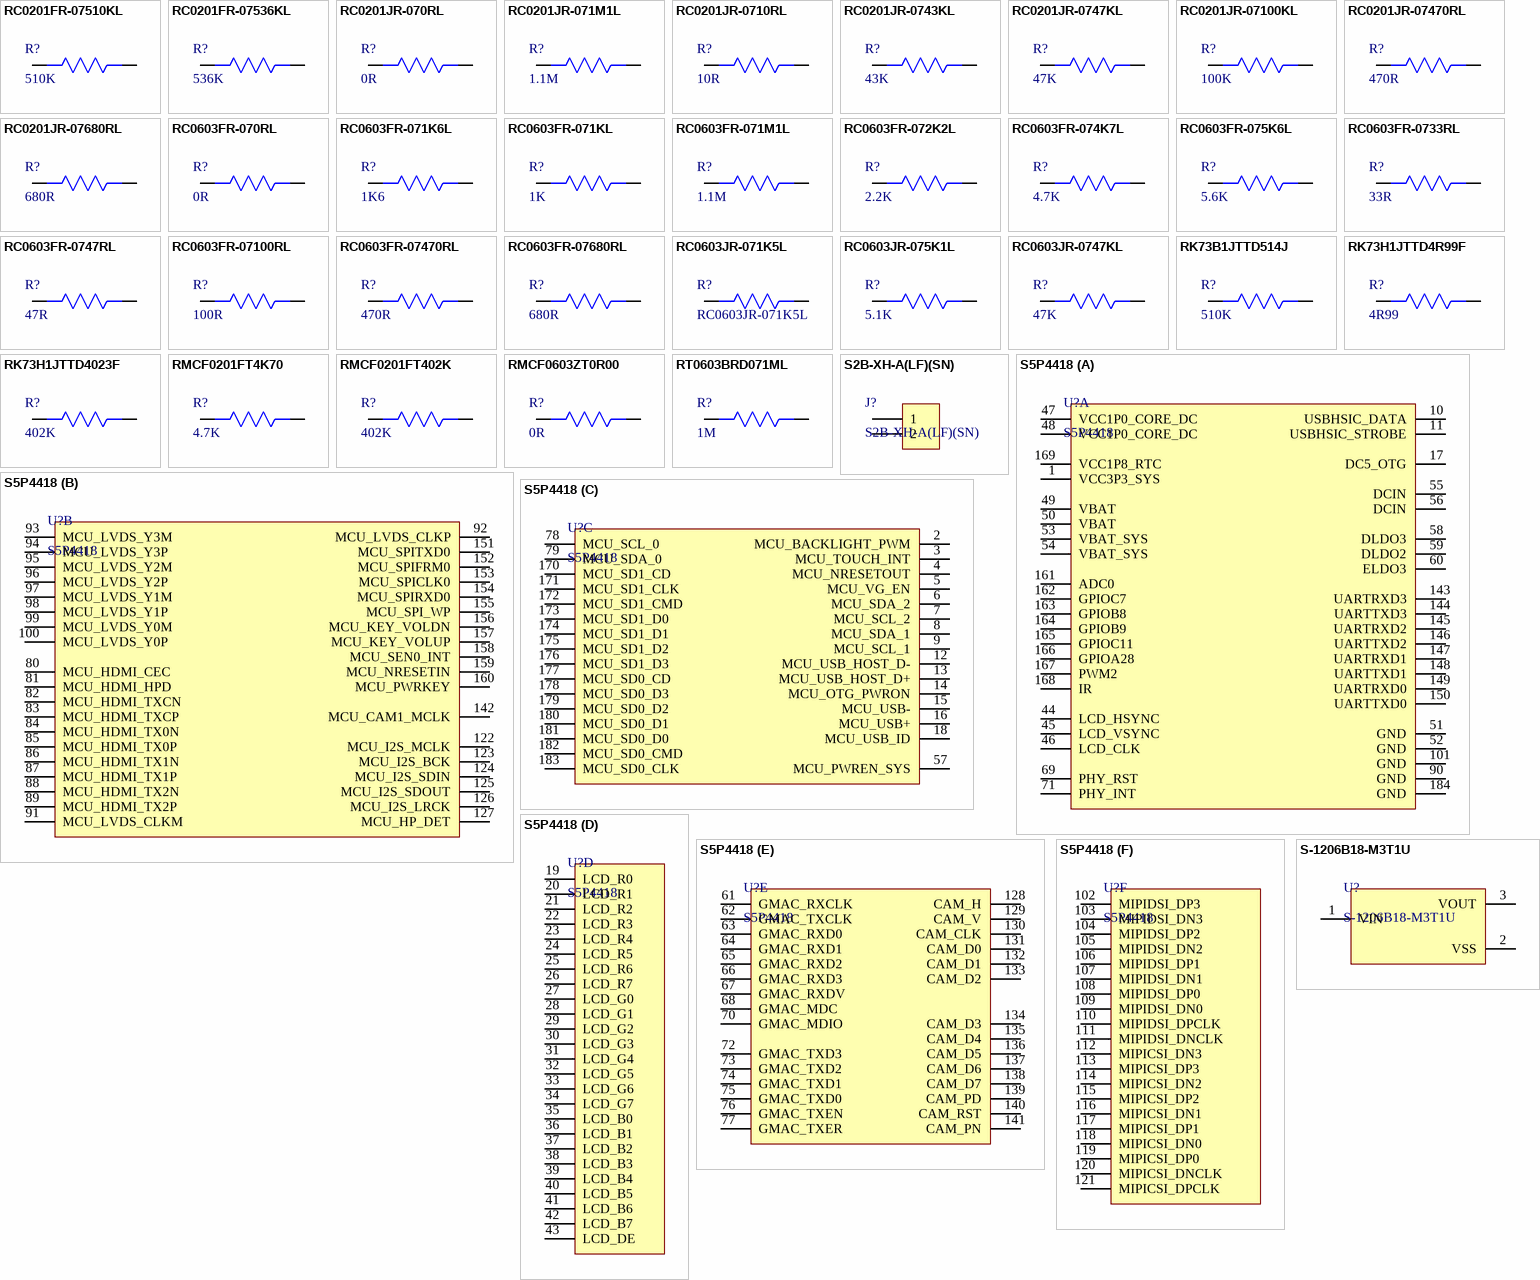
[diagram p3: symbols RC0201FR-07510KL to S-1206B18-M3T1U]